# Altium footprint library Ether to laser.PcbLib: 23 footprints (part 1 of 2)
Each footprint in its own frame and in the unit in brackets; x right, y up, seen from the top. Pads: shape width x height; smd on the part's side, far side on the other; paste and mask are expansions set on the pad; w line width, h text height; cw(c..) or ccw(c..) is an arc to the next point about the centre after c.
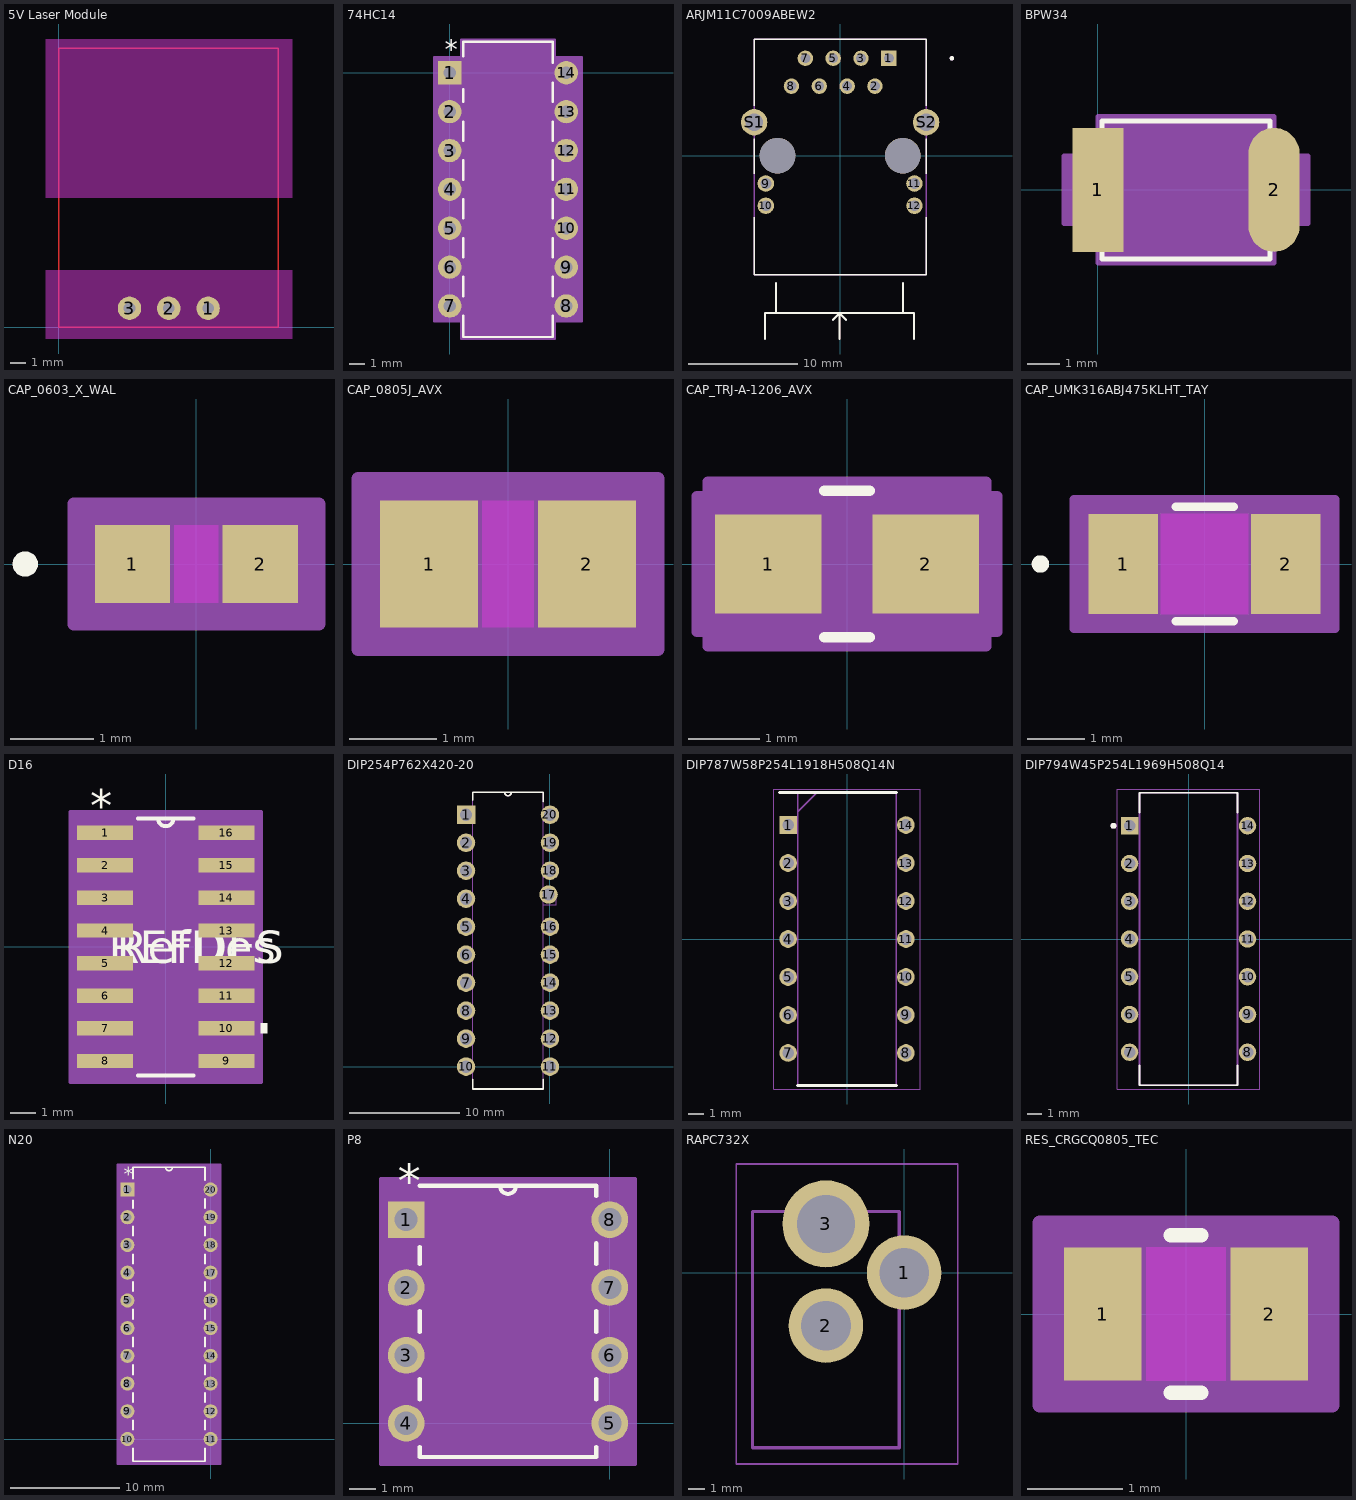
[diagram p0: the footprints below, top view; thin cyan lines are the x and y axes]

## 5V Laser Module [mil]
pads (3):
  round 60 hole 30: 1(382.91,48.74) 2(282.01,48.74) 3(181.1,48.74)
Top Layer:
  lines w3.94: 0,0 0,716.54 562.99,716.54 562.99,0 0,0
Keep-Out Layer:
  rectangle: -35,331.3 600,740
  rectangle: -35,-30 600,147.48
3D body "LaserModule.stp": height 311.81, standoff 24.41, extent -5,-123.41 572.95,873.41

## 74HC14 [mil]
pads (14):
  rect 60x60 hole 32 paste-99999 mask+0: 1(0,0)
  round 60 hole 32 paste-99999 mask+0: 2(0,-100) 3(0,-200) 4(0,-300) 5(0,-400) 6(0,-500) 7(0,-600) 8(300,-600) 9(300,-500) 10(300,-400) 11(300,-300) 12(300,-200) 13(300,-100) 14(300,0)
Top Overlay:
  lines w6: 35,-625.15 35,-680 265,-680 265,-625.15 ; 35,-574.85 35,-525.15 ; 35,-474.85 35,-425.15 ; 35,-374.85 35,-325.15 ; 35,-274.85 35,-225.15 ; 35,-174.85 35,-125.15 ; 35,-74.85 35,-42.11 ; 35,42.11 35,80 265,80 265,25.15 ; 265,-574.85 265,-525.15 ; 265,-474.85 265,-425.15 ; 265,-374.85 265,-325.15 ; 265,-274.85 265,-225.15 ; 265,-174.85 265,-125.15 ; 265,-74.85 265,-25.15
  text ".Designator" at 12.5,-325 h50
  text "*" at -12.5,35 h50
Mechanical 13:
  lines w1: 138,75 ccw(c150,75) 162,75 ; -16,-616 40,-616 40,-584 -16,-584 -16,-616 ; -16,-516 40,-516 40,-484 -16,-484 -16,-516 ; -16,-416 40,-416 40,-384 -16,-384 -16,-416 ; -16,-316 40,-316 40,-284 -16,-284 -16,-316 ; -16,-216 40,-216 40,-184 -16,-184 -16,-216 ; -16,-116 40,-116 40,-84 -16,-84 -16,-116 ; -16,-16 40,-16 40,16 -16,16 -16,-16 ; 40,-675 40,75 260,75 260,-675 40,-675 ; 260,-616 316,-616 316,-584 260,-584 260,-616 ; 260,-516 316,-516 316,-484 260,-484 260,-516 ; 260,-416 316,-416 316,-384 260,-384 260,-416 ; 260,-316 316,-316 316,-284 260,-284 260,-316 ; 260,-216 316,-216 316,-184 260,-184 260,-216 ; 260,-116 316,-116 316,-84 260,-84 260,-116 ; 260,-16 316,-16 316,16 260,16 260,-16
  text "*" at 37.5,-25 h50
  text ".Designator" at 12.5,-325 h50
Mechanical 15:
  region: 270,-640 340,-640 340,40 270,40 270,85 30,85 30,40 -40,40 -40,-640 30,-640 30,-685 270,-685
  lines w6: -40,-640 30,-640 30,-685 270,-685 270,-640 340,-640 340,40 270,40 270,85 30,85 30,40 -40,40 -40,-640
3D body "DIP14_300_TEX.step": height 205.12, standoff -100, extent -5,-675 315,75

## ARJM11C7009ABEW2 [mm]
pads (16):
  rect 1.408x1.408 / inner round 1.408 / far side rect 1.408x1.408 hole 0.9: 1(4.445,8.89)
  round 1.408 hole 0.9: 2(3.175,6.35) 3(1.905,8.89) 4(0.635,6.35) 5(-0.635,8.89) 6(-1.905,6.35) 7(-3.175,8.89) 8(-4.445,6.35)
  round 1.508 hole 1: 9(-6.785,-2.54) 10(-6.785,-4.57) 11(6.785,-2.54) 12(6.785,-4.57)
  round 2.4 hole 1.6: S1(-7.85,3.05) S2(7.85,3.05)
  round 3.25 hole 3.25 unplated: ""(-5.715,0) ""(5.715,0)
Top Overlay:
  circle w0.2: c10.2,8.89 r0.1
  lines w0.127: -7.85,-5.6 -7.85,-10.85 7.85,-10.85 7.85,-5.6 ; -7.85,-1.65 -7.85,1.53 ; -7.85,4.57 -7.85,10.65 7.85,10.65 7.85,4.57 ; 7.85,-1.65 7.85,1.53
  lines w0.2: -6.858,-16.713 -6.858,-14.363 6.742,-14.363 6.742,-16.713 ; -5.858,-14.363 -5.858,-11.633 ; -0.658,-14.983 -0.058,-14.383 ; -0.058,-16.733 -0.058,-14.383 ; 0.542,-14.983 -0.058,-14.383 ; 5.742,-14.363 5.742,-11.633
Mechanical 13:
  circle w0.2: c10.2,8.89 r0.1
  lines w0.127: -7.85,-10.85 -7.85,10.65 7.85,10.65 7.85,-10.85 -7.85,-10.85
Mechanical 29:
  lines w0.127: -7.85,-10.85 7.85,-10.85 7.85,10.65 -7.85,10.65 -7.85,-10.85
  text ".Designator" at -3.861,-0.136 h0.89
3D body "step_temp.STEP": height 15.3, standoff -3.6, extent -9.449,-10.795 9.449,10.855

## BPW34 [mil]
pads (2):
  rect 62x150 smd paste-99999 mask+0: 1(0,0)
  oval 62x150 smd paste-99999 mask+0: 2(213,0)
Top Overlay:
  lines w6: 5,-44.1 5,-83.5 208,-83.5 208,-43.82 ; 5,44.1 5,83.5 208,83.5 208,43.82
Mechanical 13:
  lines w1: 94.5,78.5 ccw(c106.5,78.5) 118.5,78.5 ; -21,-21 10,-21 10,21 -21,21 -21,-21 ; 10,-78.5 10,78.5 203,78.5 203,-78.5 10,-78.5 ; 203,-21 234,-21 234,21 203,21 203,-21
  text "*" at 7.5,-25 h50
Mechanical 15:
  region: 213,-41 254,-41 254,41 213,41 213,88.5 0,88.5 0,41 -41,41 -41,-41 0,-41 0,-88.5 213,-88.5
  lines w6: -41,-41 0,-41 0,-88.5 213,-88.5 213,-41 254,-41 254,41 213,41 213,88.5 0,88.5 0,41 -41,41 -41,-41
3D body "LED_BPW34_VIS.step": height 98.5, standoff -58.5, extent -11.5,-2.09 221.5,190

## CAP_0603_X_WAL [mil]
pads (2):
  rect 35.78x37 smd paste+0 mask+0: 1(-30.39,0) 2(30.39,0)
Top Layer keep-out:
  region: -10.5,-16.5 -10.5,16.5 10.5,16.5 10.5,-16.5
Top Overlay:
  circle w6: c-81.28,0 r3
  text ".Designator" at -137.5,-25 h50
Keep-Out Layer:
  region: -10.5,-18.5 -10.5,18.5 10.5,18.5 10.5,-18.5
Mechanical 13:
  circle w1: c-24.5,0 r3
  lines w1: -34.5,-18.5 -34.5,18.5 ; -34.5,-18.5 -12.5,-18.5 -12.5,18.5 -34.5,18.5 ; -34.5,-18.5 34.5,-18.5 ; -34.5,-18.5 -34.5,18.5 ; -34.5,18.5 34.5,18.5 ; 34.5,-18.5 12.5,-18.5 12.5,18.5 34.5,18.5 ; 34.5,-18.5 34.5,18.5 ; 34.5,-18.5 34.5,18.5
Mechanical 15:
  region: 58.28,-28.5 -58.28,-28.5 -58.28,28.5 58.28,28.5
  lines w6: -58.28,-28.5 -58.28,28.5 58.28,28.5 58.28,-28.5 -58.28,-28.5
3D body "CAP_0603_X_WAL.step": height 37.01, standoff 0, extent -34.49,-18.5 34.49,18.5

## CAP_0805J_AVX [mil]
pads (2):
  rect 44x57 smd paste+0 mask+0: 1(-35.5,0) 2(35.5,0)
Top Layer keep-out:
  region: -11.5,-26.5 -11.5,26.5 11.5,26.5 11.5,-26.5
Top Overlay:
  text ".Designator" at -137.5,-25 h50
Keep-Out Layer:
  region: -11.5,-28.5 -11.5,28.5 11.5,28.5 11.5,-28.5
Mechanical 13:
  lines w1: -43.5,-28.5 -43.5,28.5 ; -43.5,-28.5 43.5,-28.5 ; -43.5,-28.5 -13.5,-28.5 -13.5,28.5 -43.5,28.5 ; -43.5,-28.5 -43.5,28.5 ; -43.5,28.5 43.5,28.5 ; 43.5,-28.5 43.5,28.5 ; 43.5,-28.5 43.5,28.5 ; 43.5,-28.5 13.5,-28.5 13.5,28.5 43.5,28.5
Mechanical 15:
  region: 67.5,-38.5 -67.5,-38.5 -67.5,38.5 67.5,38.5
  lines w6: -67.5,-38.5 67.5,-38.5 67.5,38.5 -67.5,38.5 -67.5,-38.5
3D body "CAP_0805J_AVX.step": height 37.01, standoff 0, extent -43.5,-28.5 43.5,28.5

## CAP_TRJ-A-1206_AVX [mil]
pads (2):
  rect 58.96x55 smd paste+0 mask+0: 1(-43.52,0) 2(43.52,0)
Top Overlay:
  lines w6: -12.43,-40.5 12.43,-40.5 ; -12.43,40.5 12.43,40.5
Mechanical 13:
  lines w1: -67,-35.5 -67,35.5 67,35.5 67,-35.5 -67,-35.5
Mechanical 15:
  region: -77,-37.5 -83,-37.5 -83,37.5 -77,37.5 -77,45.5 77,45.5 77,37.5 83,37.5 83,-37.5 77,-37.5 77,-45.5 -77,-45.5
  lines w6: -83,-37.5 -77,-37.5 -77,-45.5 77,-45.5 77,-37.5 83,-37.5 83,37.5 77,37.5 77,45.5 -77,45.5 -77,37.5 -83,37.5 -83,-37.5
3D body "CAP_TRJ-A-1206_AVX.step": height 72.99, standoff 0, extent -67.01,-35.51 67.01,35.51

## CAP_UMK316ABJ475KLHT_TAY [mil]
pads (2):
  rect 48x69 smd paste+0 mask+0: 1(-56,0) 2(56,0)
Top Layer keep-out:
  region: -30,-32.5 -30,32.5 30,32.5 30,-32.5
Top Overlay:
  circle w6: c-113,0 r3
  lines w6: -19.89,-39.5 19.89,-39.5 ; -19.89,39.5 19.89,39.5
  text ".Designator" at -137.5,-25 h50
Keep-Out Layer:
  region: -30,-34.5 -30,34.5 30,34.5 30,-34.5
Mechanical 13:
  circle w1: c-51,0 r3
  lines w1: -66,-34.5 -66,34.5 ; -66,-34.5 -32,-34.5 -32,34.5 -66,34.5 ; -66,-34.5 66,-34.5 ; -66,-34.5 -66,34.5 ; -66,34.5 66,34.5 ; 66,-34.5 32,-34.5 32,34.5 66,34.5 ; 66,-34.5 66,34.5 ; 66,-34.5 66,34.5
Mechanical 15:
  region: 90,-44.5 -90,-44.5 -90,44.5 90,44.5
  lines w6: -90,-44.5 -90,44.5 90,44.5 90,-44.5 -90,-44.5
3D body "CAP_UMK316ABJ475KLHT_TAY.step": height 70.98, standoff 0, extent -65.98,-34.49 65.98,34.49

## D16 [mil]
pads (16):
  rect 86x22 smd paste-43 mask-43: 1(-93,175) 2(-93,125) 3(-93,75) 4(-93,25) 5(-93,-25) 6(-93,-75) 7(-93,-125) 8(-93,-175) 9(93,-175) 10(93,-125) 11(93,-75) 12(93,-25) 13(93,25) 14(93,75) 15(93,125) 16(93,175)
Top Overlay:
  region: 146,-117.5 156,-117.5 156,-132.5 146,-132.5
  lines w6: -42.89,-197 42.89,-197 ; -42.89,197 42.89,197 ; -12,197 ccw(c0,197) 12,197
  text "REFDES" at -87.5,-25 h50
  text "*" at -115.5,192 h50
  text "RefDes" at -75,-25 h50
Mechanical 13:
  lines w0: -12,197 ccw(c0,197) 12,197
  lines w1: -122,-185 -122,-165 -78.5,-165 -78.5,-185 -122,-185 ; -122,-135 -122,-115 -78.5,-115 -78.5,-135 -122,-135 ; -122,-85 -122,-65 -78.5,-65 -78.5,-85 -122,-85 ; -122,-35 -122,-15 -78.5,-15 -78.5,-35 -122,-35 ; -122,15 -122,35 -78.5,35 -78.5,15 -122,15 ; -122,65 -122,85 -78.5,85 -78.5,65 -122,65 ; -122,115 -122,135 -78.5,135 -78.5,115 -122,115 ; -122,165 -122,185 -78.5,185 -78.5,165 -122,165 ; -78.5,-197 78.5,-197 78.5,197 -78.5,197 -78.5,-197 ; 78.5,-185 78.5,-165 122,-165 122,-185 78.5,-185 ; 78.5,-135 78.5,-115 122,-115 122,-135 78.5,-135 ; 78.5,-85 78.5,-65 122,-65 122,-85 78.5,-85 ; 78.5,-35 78.5,-15 122,-15 122,-35 78.5,-35 ; 78.5,15 78.5,35 122,35 122,15 78.5,15 ; 78.5,65 78.5,85 122,85 122,65 78.5,65 ; 78.5,115 78.5,135 122,135 122,115 78.5,115 ; 78.5,165 78.5,185 122,185 122,165 78.5,165
  text "*" at -115.5,192 h50
  text "RefDes2" at -87.5,-25 h50
Mechanical 15:
  region: 146,-207 -146,-207 -146,207 146,207
  lines w6: -146,-207 -146,207 146,207 146,-207 -146,-207
3D body "D16.step": height 69.09, standoff 0, extent -122.01,-197.01 122.01,197.01

## DIP254P762X420-20 [mil]
pads (20):
  rect 66x66 / inner round 66 / far side rect 66x66 hole 44: 1(-300,900)
  round 66 hole 44: 2(-300,800) 3(-300,700) 4(-300,600) 5(-300,500) 6(-300,400) 7(-300,300) 8(-300,200) 9(-300,100) 10(-300,0) 11(0,0) 12(0,100) 13(0,200) 14(0,300) 15(0,400) 16(0,500) 17(-5,615) 18(0,700) 19(0,800) 20(0,900)
Top Overlay:
  lines w6: -276,-46 -276,-80 -24,-80 -24,-46 ; -276,952 -276,980 -162,980 ; -24,946 -24,980 -138,980 ; -162,980 ccw(c-150,980) -138,980 ; -162,980 -138,980
Mechanical 13:
  lines w0: -162,980 ccw(c-150,980) -138,980 ; -162,980 -138,980 ; -162,980 -276,980 -276,-80 -24,-80 -24,980 -138,980 ; -322,-22 -322,22 -276,22 -276,-22 -322,-22 ; -322,78 -322,122 -276,122 -276,78 -322,78 ; -322,178 -322,222 -276,222 -276,178 -322,178 ; -322,278 -322,322 -276,322 -276,278 -322,278 ; -322,378 -322,422 -276,422 -276,378 -322,378 ; -322,478 -322,522 -276,522 -276,478 -322,478 ; -322,578 -322,622 -276,622 -276,578 -322,578 ; -322,678 -322,722 -276,722 -276,678 -322,678 ; -322,778 -322,822 -276,822 -276,778 -322,778 ; -322,878 -322,922 -276,922 -276,878 -322,878 ; -24,-22 -24,22 22,22 22,-22 -24,-22 ; -24,78 -24,122 22,122 22,78 -24,78 ; -24,178 -24,222 22,222 22,178 -24,178 ; -24,278 -24,322 22,322 22,278 -24,278 ; -24,378 -24,422 22,422 22,378 -24,378 ; -24,478 -24,522 22,522 22,478 -24,478 ; -24,578 -24,622 22,622 22,578 -24,578 ; -24,678 -24,722 22,722 22,678 -24,678 ; -24,778 -24,822 22,822 22,778 -24,778 ; -24,878 -24,922 22,922 22,878 -24,878
3D body "step_temp.STEP": height 180, standoff -140, extent -300.75,-70 10.75,970

## DIP787W58P254L1918H508Q14N [mil]
pads (14):
  rect 46.61x46.61 / inner round 46.61 / far side rect 46.61x46.61 hole 30.87: 1(-155,300)
  round 46.61 hole 30.87: 2(-155,200) 3(-155,100) 4(-155,0) 5(-155,-100) 6(-155,-200) 7(-155,-300) 8(155,-300) 9(155,-200) 10(155,-100) 11(155,0) 12(155,100) 13(155,200) 14(155,300)
Top Overlay:
  lines w7.87: -178.31,385.04 130,385.04 ; -130,-385.04 130,-385.04
Mechanical 15:
  lines w3.94: -130,335.04 -80,385.04 ; -130,-385.04 -130,385.04 130,385.04 130,-385.04 -130,-385.04
Mechanical 20:
  lines w1.97: -193.15,-394.88 -193.15,394.88 193.15,394.88 193.15,-394.88 -193.15,-394.88
3D body "LM710CN.stp": height 205, standoff -132.8, extent -166.5,-377.56 155,377.56

## DIP794W45P254L1969H508Q14 [mm]
pads (14):
  rect 1.17x1.17 / inner round 1.17 / far side rect 1.17x1.17 hole 0.77 mask+0.102: 1(-3.97,7.62)
  round 1.17 hole 0.77 mask+0.102: 2(-3.97,5.08) 3(-3.97,2.54) 4(-3.97,0) 5(-3.97,-2.54) 6(-3.97,-5.08) 7(-3.97,-7.62) 8(3.97,-7.62) 9(3.97,-5.08) 10(3.97,-2.54) 11(3.97,0) 12(3.97,2.54) 13(3.97,5.08) 14(3.97,7.62)
Top Overlay:
  circle w0.2: c-5.055,7.62 r0.1
  lines w0.127: -3.3,-8.525 -3.3,-9.845 3.3,-9.845 3.3,-8.525 ; -3.3,8.525 -3.3,9.845 3.3,9.845 3.3,8.525
Mechanical 13:
  circle w0.2: c-5.055,7.62 r0.1
  lines w0.127: -3.3,-9.845 3.3,-9.845 3.3,9.845 -3.3,9.845 -3.3,-9.845
Mechanical 15:
  lines w0.05: -4.805,-10.095 4.805,-10.095 4.805,10.095 -4.805,10.095 -4.805,-10.095
3D body "step_temp.STEP": height 5.08, standoff -3.18, extent -3.935,-9.653 3.935,9.653

## N20 [mil]
pads (20):
  rect 51x51 hole 31 paste-99999 mask-25.5: 1(-300,900)
  round 51 hole 31 paste-99999 mask-25.5: 2(-300,800) 3(-300,700) 4(-300,600) 5(-300,500) 6(-300,400) 7(-300,300) 8(-300,200) 9(-300,100) 10(-300,0) 11(0,0) 12(0,100) 13(0,200) 14(0,300) 15(0,400) 16(0,500) 17(0,600) 18(0,700) 19(0,800) 20(0,900)
Top Overlay:
  lines w6: -280,-33.01 -280,-80 -20,-80 -20,-33.01 ; -280,33.01 -280,66.99 ; -280,133.01 -280,166.99 ; -280,233.01 -280,266.99 ; -280,333.01 -280,366.99 ; -280,433.01 -280,466.99 ; -280,533.01 -280,566.99 ; -280,633.01 -280,666.99 ; -280,733.01 -280,766.99 ; -280,833.01 -280,861.4 ; -280,938.6 -280,980 -20,980 -20,933.01 ; -162,980 ccw(c-150,980) -138,980 ; -20,33.01 -20,66.99 ; -20,133.01 -20,166.99 ; -20,233.01 -20,266.99 ; -20,333.01 -20,366.99 ; -20,433.01 -20,466.99 ; -20,533.01 -20,566.99 ; -20,633.01 -20,666.99 ; -20,733.01 -20,766.99 ; -20,833.01 -20,866.99
  text "*" at -312.5,930.5 h50
  text ".Designator" at -287.5,425 h50
Mechanical 13:
  lines w1: -162,980 ccw(c-150,980) -138,980 ; -315.5,-15.5 -315.5,15.5 -280,15.5 -280,-15.5 -315.5,-15.5 ; -315.5,84.5 -315.5,115.5 -280,115.5 -280,84.5 -315.5,84.5 ; -315.5,184.5 -315.5,215.5 -280,215.5 -280,184.5 -315.5,184.5 ; -315.5,284.5 -315.5,315.5 -280,315.5 -280,284.5 -315.5,284.5 ; -315.5,384.5 -315.5,415.5 -280,415.5 -280,384.5 -315.5,384.5 ; -315.5,484.5 -315.5,515.5 -280,515.5 -280,484.5 -315.5,484.5 ; -315.5,584.5 -315.5,615.5 -280,615.5 -280,584.5 -315.5,584.5 ; -315.5,684.5 -315.5,715.5 -280,715.5 -280,684.5 -315.5,684.5 ; -315.5,784.5 -315.5,815.5 -280,815.5 -280,784.5 -315.5,784.5 ; -315.5,884.5 -315.5,915.5 -280,915.5 -280,884.5 -315.5,884.5 ; -280,-80 -20,-80 -20,980 -280,980 -280,-80 ; -20,-15.5 -20,15.5 15.5,15.5 15.5,-15.5 -20,-15.5 ; -20,84.5 -20,115.5 15.5,115.5 15.5,84.5 -20,84.5 ; -20,184.5 -20,215.5 15.5,215.5 15.5,184.5 -20,184.5 ; -20,284.5 -20,315.5 15.5,315.5 15.5,284.5 -20,284.5 ; -20,384.5 -20,415.5 15.5,415.5 15.5,384.5 -20,384.5 ; -20,484.5 -20,515.5 15.5,515.5 15.5,484.5 -20,484.5 ; -20,584.5 -20,615.5 15.5,615.5 15.5,584.5 -20,584.5 ; -20,684.5 -20,715.5 15.5,715.5 15.5,684.5 -20,684.5 ; -20,784.5 -20,815.5 15.5,815.5 15.5,784.5 -20,784.5 ; -20,884.5 -20,915.5 15.5,915.5 15.5,884.5 -20,884.5
  text "*" at -312.5,930.5 h50
  text ".Designator" at -287.5,425 h50
Mechanical 15:
  region: 35.5,-90 -335.5,-90 -335.5,990 35.5,990
  lines w6: -335.5,-90 35.5,-90 35.5,990 -335.5,990 -335.5,-90
3D body "N20.step": height 207.12, standoff -98, extent -310,-80 10,980

## P8 [mil]
pads (8):
  rect 54x54 hole 34 paste-99999 mask-27: 1(-300,300)
  round 54 hole 34 paste-99999 mask-27: 2(-300,200) 3(-300,100) 4(-300,0) 5(0,0) 6(0,100) 7(0,200) 8(0,300)
Top Overlay:
  lines w6: -280,-34.76 -280,-50 -20,-50 -20,-34.76 ; -280,34.76 -280,65.24 ; -280,134.76 -280,165.24 ; -280,234.76 -280,259.9 ; -280,350 -20,350 -20,334.76 ; -162,350 ccw(c-150,350) -138,350 ; -20,34.76 -20,65.24 ; -20,134.76 -20,165.24 ; -20,234.76 -20,265.24
  text "*" at -312.5,332 h50
  text ".Designator" at -287.5,125 h50
Mechanical 13:
  lines w1: -162,350 ccw(c-150,350) -138,350 ; -317,-17 -317,17 -280,17 -280,-17 -317,-17 ; -317,83 -317,117 -280,117 -280,83 -317,83 ; -317,183 -317,217 -280,217 -280,183 -317,183 ; -317,283 -317,317 -280,317 -280,283 -317,283 ; -280,-50 -20,-50 -20,350 -280,350 -280,-50 ; -20,-17 -20,17 17,17 17,-17 -20,-17 ; -20,83 -20,117 17,117 17,83 -20,83 ; -20,183 -20,217 17,217 17,183 -20,183 ; -20,283 -20,317 17,317 17,283 -20,283
  text ".Designator" at -287.5,125 h50
  text "*" at -312.5,332 h50
Mechanical 15:
  region: 37,-60 -337,-60 -337,360 37,360
  lines w6: -337,-60 37,-60 37,360 -337,360 -337,-60
3D body "P8.step": height 244.49, standoff -60.63, extent -310,-55 10,345

## RAPC732X [mm]
pads (3):
  round 4.575 hole 3.05: 1(0,0) 2(-4.8,-3.25)
  round 5.34 hole 3.56: 3(-4.8,3)
Bottom Assembly:
  lines w0.1: -10.3,-11.74 -10.3,6.67 3.288,6.67 3.288,-11.74 -10.3,-11.74
  lines w0.2: -9.3,-10.74 -9.3,3.76 -0.3,3.76 -0.3,-10.74 -9.3,-10.74
Mechanical 7:
  lines w0.1: -7.8,3.76 -9.3,3.76 -9.3,-10.74 -0.3,-10.74 -0.3,-2.74 ; -0.8,3.76 -0.3,3.76 -0.3,3.26
3D body "RAPC732X.stp": height 10.83, standoff -3.57, extent -9.093,-10.668 0.457,3.832

## RES_CRGCQ0805_TEC [mil]
pads (2):
  rect 32x55 smd paste+0 mask+0: 1(-34.32,0) 2(34.32,0)
Top Layer keep-out:
  region: -16.32,-25.5 -16.32,25.5 16.32,25.5 16.32,-25.5
Top Overlay:
  lines w6: -6.21,-32.5 6.21,-32.5 ; -6.21,32.5 6.21,32.5
Keep-Out Layer:
  region: -16.32,-27.5 -16.32,27.5 16.32,27.5 16.32,-27.5
Mechanical 13:
  lines w1: -42.32,-27.5 -42.32,27.5 ; -42.32,-27.5 42.32,-27.5 ; -42.32,-27.5 -18.32,-27.5 -18.32,27.5 -42.32,27.5 ; -42.32,-27.5 -42.32,27.5 ; -42.32,27.5 42.32,27.5 ; 42.32,-27.5 42.32,27.5 ; 42.32,-27.5 42.32,27.5 ; 42.32,-27.5 18.32,-27.5 18.32,27.5 42.32,27.5
Mechanical 15:
  region: 60.32,-37.5 -60.32,-37.5 -60.32,37.5 60.32,37.5
  lines w6: -60.32,-37.5 60.32,-37.5 60.32,37.5 -60.32,37.5 -60.32,-37.5
3D body "RES_CRGCQ0805_TEC.step": height 25.98, standoff 0, extent -42.32,-27.48 42.32,27.48